# Altium schematic symbol library MOS栅极保护稳压管_BZT52C12-7-F.SCHLIB: 1 symbol
Pins are listed as number, name and electrical type; pins without a type are passive.

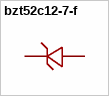
[diagram p0: symbol bzt52c12-7-f]

## bzt52c12-7-f
designator D??  (value not drawn)
二极管配置:1个独立式;稳压值(标称值):12V;稳压值(范围值):11.4V~12.7V;耗散功率(Pd):370mW;; Manufacturer: DIODES(美台); AddInBom: yes; ModelId: ad7e39f9e5534b3c96ffdc5532ebb493; ModelName: SOD-123_L2.7-W1.6-H1.4-LS3.7; ModelTransform: 146.026,62.992,0,180,0,0,0.0005,0,0; Diode Configuration: 1个独立式; Zener Voltage(Nom): 12V; Reverse Leakage Current (Ir): 100nA@1V; Pd - Power Dissipation: 370mW; Impedance(Zzt): 25Ω; Impedance(Zzk): 150Ω; Operating Junction Temperature Range: -65℃~+150℃; Symbol: BZT52C12-7-F; LCSC Part Name: 独立式 耐压:12V 电流:0.1uA@1.0V; SupplierPart: C124196; ManufacturerPart: BZT52C12-7-F; Supplier Footprint: SOD-123; JLCPCB Part Class: Extended Part; Datasheet: https://item.szlcsc.com/datasheet/BZT52C12-7-F/125471.html; Supplier: LCSC; ConvertToPcb: yes; FootprintName: SOD-123_L2.7-W1.6-LS3.7-RD; Zener Voltage(Range): 11.4V~12.7V; Tolerance: -
footprint SOD-123_L2.7-W1.6-LS3.7-RD
pins: 1 C, 2 A